# Altium schematic symbol library CSD75207W15.SchLib: 1 symbol
Pins are listed as number, name and electrical type; pins without a type are passive.

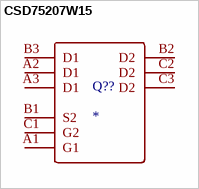
[diagram p0: symbol CSD75207W15]

## CSD75207W15
designator Q??
footprint DSBGA-9_L1.5-W1.5-R3-C3-P0.50-BL
pins: A1 G1, A2 D1, A3 D1, B1 S2, B2 D2, B3 D1, C1 G2, C2 D2, C3 D2